# Altium footprint library 1985807.PcbLib: 1 footprints
Each footprint in its own frame and in the unit in brackets; x right, y up, seen from the top. Pads: shape width x height; smd on the part's side, far side on the other; paste and mask are expansions set on the pad; w line width, h text height; cw(c..) or ccw(c..) is an arc to the next point about the centre after c.
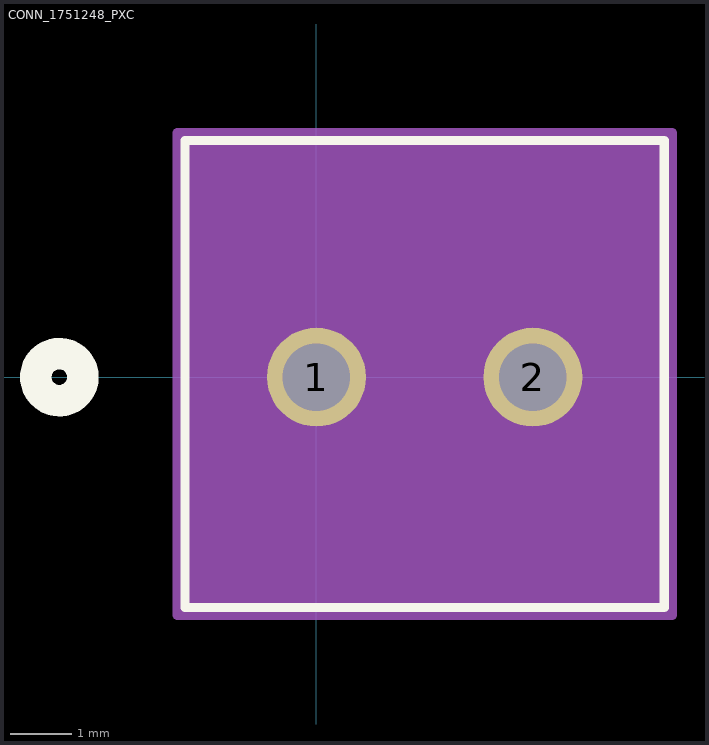
[diagram p0: the footprint, top view; thin cyan lines are the x and y axes]

## CONN_1751248_PXC [mil]
pads (2):
  round 63 hole 43 paste-31.5 mask+0: 1(0,0) 2(137.8,0)
Top Overlay:
  circle w20: c-163.74,0 r15
  lines w6: -83.74,-146.73 221.54,-146.73 221.54,150.67 -83.74,150.67 -83.74,-146.73
  text ".Designator" at -68.6,-25 h50
Bottom Overlay:
  circle w20: c-163.74,0 r15
Mechanical 13:
  circle w20: c0,0 r15
  lines w1: -78.74,-141.73 216.54,-141.73 216.54,145.67 -78.74,145.67 -78.74,-141.73
  text ".Designator" at -68.6,-25 h50
Mechanical 15:
  region: 226.54,155.67 -88.74,155.67 -88.74,-151.73 226.54,-151.73
  lines w6: -88.74,-151.73 -88.74,155.67 226.54,155.67 226.54,-151.73 -88.74,-151.73